# Altium footprint library Connectors.PcbLib: 319 footprints (part 13 of 20)
Each footprint in its own frame and in the unit in brackets; x right, y up, seen from the top. Pads: shape width x height; smd on the part's side, far side on the other; paste and mask are expansions set on the pad; w line width, h text height; cw(c..) or ccw(c..) is an arc to the next point about the centre after c.
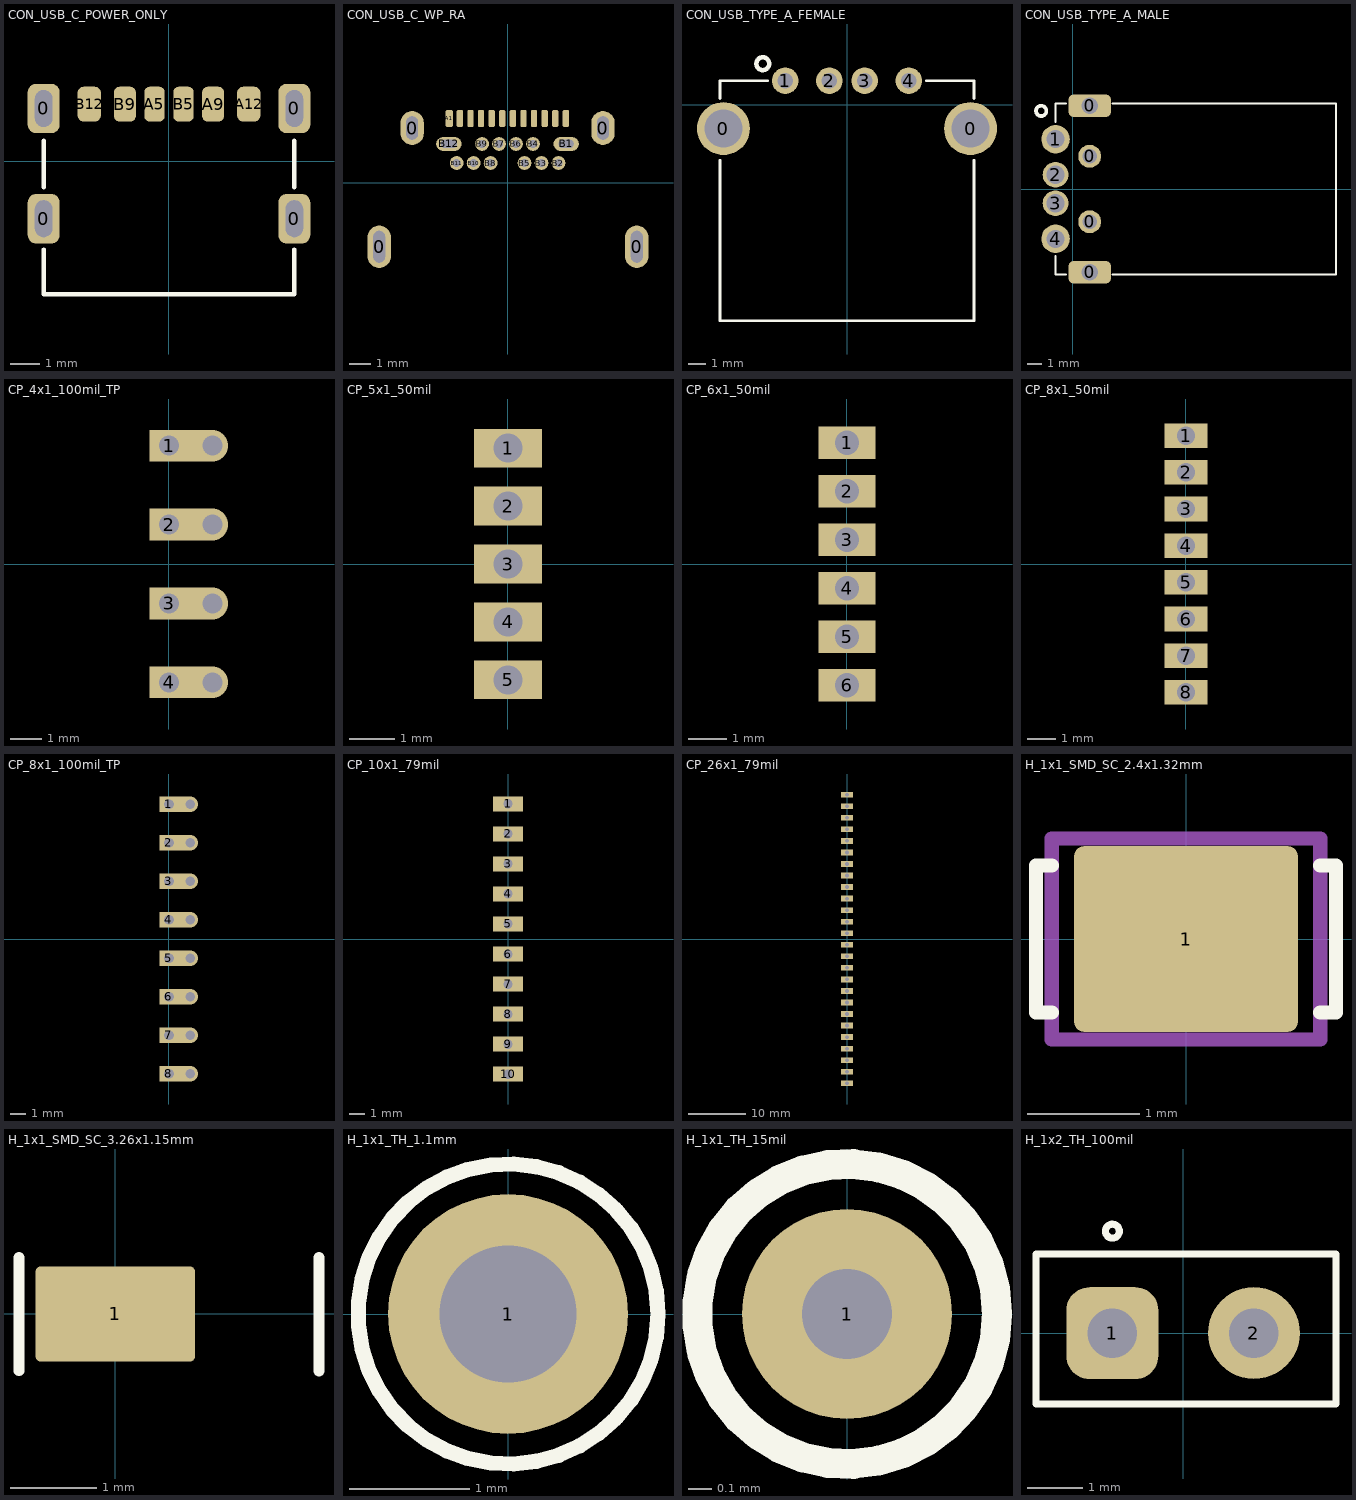
[diagram p12: the footprints below, top view; thin cyan lines are the x and y axes]

## CON_USB_C_POWER_ONLY [mm] "/20210318/V-A.Patino"
pads (10):
  rrect50% 1.1x1.7 hole 1.27 slot 0.6 at 0 deg: 0(-4.32,-1.975) 0(-4.32,1.825) 0(4.32,-1.975) 0(4.32,1.825)
  rrect50% 0.7x1.2 smd: A5(-0.5,1.975) B5(0.5,1.975)
  rrect50% 0.76x1.2 smd: A9(1.52,1.975) B9(-1.52,1.975)
  rrect50% 0.8x1.2 smd: A12(2.75,1.975) B12(-2.75,1.975)
Top Overlay:
  lines w0.152: -4.32,-3.035 -4.32,-4.575 4.32,-4.575 4.32,-3.035 ; -4.32,-0.895 -4.32,0.715 ; 4.32,-0.895 4.32,0.715
3D body: height 3.21, standoff 0, extent -4.32,-4.575 4.32,2.225

## CON_USB_C_WP_RA [mm] "/20210826/J-E.Pachon"
pads (28):
  oval 1.1x2 hole 0.55 slot 1.5 at 90 deg mask+0: 0(-6.073,-3.025) 0(6.073,-3.025)
  oval 1.1x1.6 hole 0.55 slot 1.1 at 90 deg mask+0: 0(-4.521,2.575) 0(4.479,2.575)
  rrect50% 0.35x0.8 smd: A1(-2.772,3.025)
  rrect50% 0.3x0.8 smd: A2(-2.272,3.025) A3(-1.771,3.025) A4(-1.271,3.025) A5(-0.772,3.025) A6(-0.272,3.025) A7(0.228,3.025) A8(0.728,3.025) A9(1.228,3.025) A10(1.728,3.025) A11(2.228,3.025) A12(2.728,3.025)
  oval 1.2x0.65 hole 0.381 slot 0.7 at 0 deg mask+0: B1(2.743,1.825)
  round 0.65 hole 0.381 mask+0: B2(2.38,0.925) B3(1.579,0.925) B4(1.179,1.825) B5(0.779,0.925) B6(0.379,1.825) B7(-0.421,1.825) B8(-0.821,0.925) B9(-1.221,1.825) B10(-1.621,0.925) B11(-2.422,0.925)
  oval 1.2x0.65 hole 0.381 slot 0.75 at 0 deg mask+0: B12(-2.787,1.825)
3D body "TYPE-C-31-E-12.step": height 2.53, standoff -1.89, extent -6.119,-6.665 6.081,3.325

## CON_USB_TYPE_A_FEMALE [mm] "/20210420/V-A.Patino"
pads (6):
  round 3 hole 2.159 unplated: 0(-7,-1.355) 0(7,-1.355)
  round 1.5 hole 0.889 unplated: 1(-3.5,1.355) 2(-1,1.355) 3(1,1.355) 4(3.5,1.355)
Top Overlay:
  circle w0.254: c-4.775,2.32 r0.364
  lines w0.152: -7.2,-3.145 -7.2,-12.245 7.2,-12.245 7.2,-3.145 ; -7.2,0.353 -7.2,1.355 -4.5,1.355 ; 4.5,1.355 7.2,1.355 7.2,0.353
3D body: height 6.95, standoff 0, extent -7.2,-12.245 7.2,1.355

## CON_USB_TYPE_A_MALE [mm] "/20210420/V-A.Patino"
pads (8):
  rrect50% 3x1.6 hole 1.143 square unplated: 0(1.2,-5.85) 0(1.2,5.85)
  round 1.6 hole 1.016 unplated: 0(1.2,-2.3) 0(1.2,2.3)
  round 2 hole 1.27 unplated: 1(-1.2,3.5) 4(-1.2,-3.5)
  round 1.8 hole 1.27 unplated: 2(-1.2,1) 3(-1.2,-1)
Top Overlay:
  circle w0.254: c-2.21,5.486 r0.364
  lines w0.152: -1.2,-4.7 -1.2,-6 -0.457,-6 ; -1.2,4.7 -1.2,6 -0.457,6 ; 2.819,-6 18.5,-6 18.5,6 2.819,6
3D body: height 4.5, standoff 0, extent -1.2,-6 18.5,6

## CP_4x1_100mil_TP [mil] "/ 20200103/ C-A.Serna.A"
pads (4):
  rect 80x40 hole 25 copper offset 15,0 paste-99999: 1(0,150) 2(0,50) 3(0,-50) 4(0,-150)
via 55,150 diameter 40 hole 25
via 55,50 diameter 40 hole 25
via 55,-50 diameter 40 hole 25
via 55,-150 diameter 40 hole 25

## CP_5x1_50mil [mm] "/ 20220331 N-A.Potosi"
pads (5):
  rect 1.5x0.85 hole 0.635 paste-2539.97: 1(0,2.54) 2(0,1.27) 3(0,0) 4(0,-1.27) 5(0,-2.54)

## CP_6x1_50mil [mm] "/ 20220331 N-A.Potosi"
pads (6):
  rect 1.5x0.85 hole 0.635 paste-2539.97: 1(0,3.175) 2(0,1.905) 3(0,0.635) 4(0,-0.635) 5(0,-1.905) 6(0,-3.175)

## CP_8x1_50mil [mm] "/ 20200103 C-A.Serna.A"
pads (8):
  rect 1.5x0.85 hole 0.635 paste-2539.97: 1(0,4.445) 2(0,3.175) 3(0,1.905) 4(0,0.635) 5(0,-0.635) 6(0,-1.905) 7(0,-3.175) 8(0,-4.445)

## CP_8x1_100mil_TP [mil] "/ 20200103 C-A.Serna.A"
pads (8):
  rect 80x40 hole 25 copper offset 15,0 paste-99999: 1(0,350) 2(0,250) 3(0,150) 4(0,50) 5(0,-50) 6(0,-150) 7(0,-250) 8(0,-350)
via 55,350 diameter 40 hole 25
via 55,250 diameter 40 hole 25
via 55,150 diameter 40 hole 25
via 55,50 diameter 40 hole 25
via 55,-50 diameter 40 hole 25
via 55,-150 diameter 40 hole 25
via 55,-250 diameter 40 hole 25
via 55,-350 diameter 40 hole 25

## CP_10x1_79mil [mm] "/20230808/J-A.Sepulveda"
pads (10):
  rect 2x1 hole 0.635 paste-2539.97: 1(0,9.03) 2(0,7.023) 3(0,5.016) 4(0,3.01) 5(0,1.003) 6(0,-1.003) 7(0,-3.01) 8(0,-5.016) 9(0,-7.023) 10(0,-9.03)

## CP_26x1_79mil [mm] "/20230808/J-A.Sepulveda"
pads (26):
  rect 2x1 hole 0.635 paste-2539.97: 1(0,25.082) 2(0,23.076) 3(0,21.069) 4(0,19.063) 5(0,17.056) 6(0,15.05) 7(0,13.043) 8(0,11.036) 9(0,9.03) 10(0,7.023) 11(0,5.016) 12(0,3.01) 13(0,1.003) 14(0,-1.003) 15(0,-3.01) 16(0,-5.016) 17(0,-7.023) 18(0,-9.03) 19(0,-11.036) 20(0,-13.043) 21(0,-15.05) 22(0,-17.056) 23(0,-19.063) 24(0,-21.069) 25(0,-23.076) 26(0,-25.082)

## H_1x1_SMD_SC_2.4x1.32mm [mm] "/ 20190522 / H-D.Garcia"
pads (1):
  rrect10% 2x1.66 smd paste-10: 1(0,0)
Top Overlay:
  lines w0.127: -1.2,-0.658 -1.341,-0.658 -1.341,0.658 -1.2,0.658 ; 1.2,-0.658 1.341,-0.658 1.341,0.658 1.2,0.658
Top Paste:
  rectangle: -0.25,0.18 0.95,0.78
  region: -0.45,0.78 -0.95,0.78 -0.95,0.18 -0.45,0.18
  region: -0.45,-0.18 -0.95,-0.18 -0.95,-0.78 -0.45,-0.78
  rectangle: -0.25,-0.78 0.95,-0.18
Mechanical 15:
  lines w0.127: -0.25,0 0.25,0 ; 0,-0.25 0,0.25 ; -1.2,-0.9 -1.2,0.9 1.2,0.9 1.2,-0.9 -1.2,-0.9
3D body "1054390005.stp": height 2.5, standoff -0.38, extent -1.441,-0.658 1.441,0.658

## H_1x1_SMD_SC_3.26x1.15mm [mm] "/ 20211111/ N-A.Potosi"
pads (1):
  rrect10% 1.85x1.1 smd paste-10: 1(0,0)
Top Overlay:
  lines w0.127: -1.118,-0.658 -1.118,0.658 ; 2.362,-0.66 2.362,0.656
3D body "c-1551576-5-a-3d.stp": height 3.41, standoff 0.01, extent -0.869,-0.704 2.391,0.696

## H_1x1_TH_1.1mm [mm] "/ 20210323/ N-A.Potosi"
pads (1):
  round 2 hole 1.143: 1(0,0)
Top Overlay:
  circle w0.127: c0,0 r1.252

## H_1x1_TH_15mil [mil] "/ 20190222 / C-A.Serna.A"
pads (1):
  round 35 hole 15: 1(0,0)
Top Overlay:
  circle w5: c0,0 r25
Bottom Overlay:
  circle w5: c0,0 r25

## H_1x2_TH_100mil [mil] "/ 20220725/ F-A.Ospina"
pads (2):
  rrect50% 65x65 hole 35: 1(-50,0)
  round 65 hole 35: 2(50,0)
Top Overlay:
  circle w5: c-50,72 r4.92
  lines w5: -104,-50 108,-50 108,56 -104,56 -104,-50
3D body "PPTC021LFBN-RC--3DModel-STEP-56544.STEP": height 335.5, standoff -125.5, extent -108.17,-46.85 111.83,53.15